# Altium footprint library TYPE-C-31-M-12.PcbLib: 1 footprints
Each footprint in its own frame and in the unit in brackets; x right, y up, seen from the top. Pads: shape width x height; smd on the part's side, far side on the other; paste and mask are expansions set on the pad; w line width, h text height; cw(c..) or ccw(c..) is an arc to the next point about the centre after c.
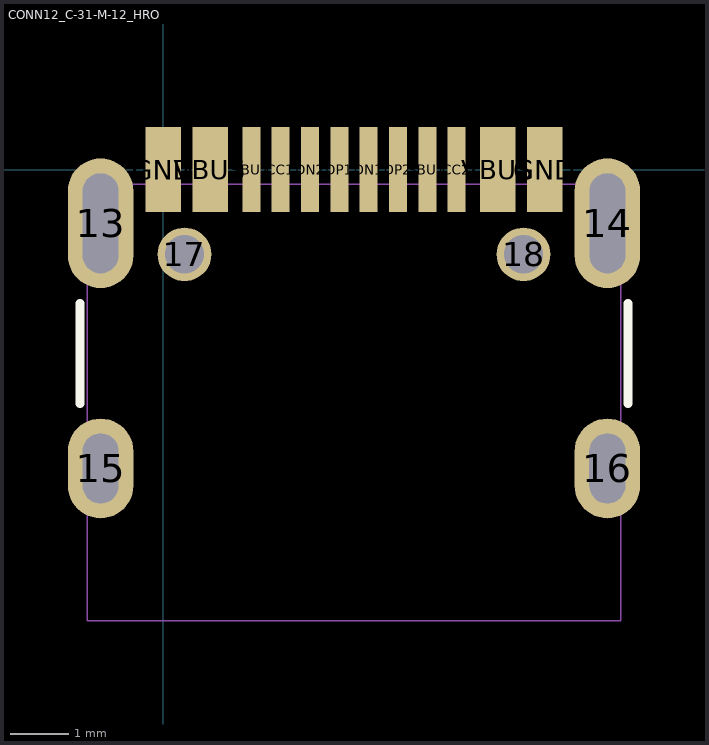
[diagram p0: the footprint, top view; thin cyan lines are the x and y axes]

## CONN12_C-31-M-12_HRO [mil]
pads (18):
  oval 44x87 / inner round 60 / far side oval 44x87 hole 24 slot 67 at 90 deg paste-99999 mask+0: 13(-42.12,-36.06) 14(298.04,-36.06)
  oval 44x67 / inner round 60 / far side oval 44x67 hole 24 slot 47 at 90 deg paste-99999 mask+0: 15(-42.12,-200.63) 16(298.04,-200.63)
  round 36 / inner round 60 / far side round 36 hole 26 paste-99999 mask-18: 17(14.18,-56.93) 18(241.74,-56.93)
  rect 12x57 smd paste-28.5 mask-28.5: CC1(78.75,0) CC2(196.87,0) DN1(137.81,0) DN2(98.43,0) DP1(118.12,0) DP2(157.5,0) SBU1(177.18,0) SBU2(59.06,0)
  rect 24x57 smd paste-28.5 mask-28.5: GND(0,0) GND(255.92,0) VBUS(31.51,0) VBUS(224.41,0)
Top Overlay:
  lines w6: -56.04,-156.91 -56.04,-89.78 ; 311.96,-156.91 311.96,-89.78
Mechanical 13:
  lines w1: -51.04,-303 306.96,-303 306.96,-10 -51.04,-10 -51.04,-303
3D body "TYPE-C-31-M-12.stp": height 127.95, standoff -33.46, extent -50.98,-303.7 300.98,7.32